# Altium footprint library Connector.PcbLib: 272 footprints (part 15 of 17)
Each footprint in its own frame and in the unit in brackets; x right, y up, seen from the top. Pads: shape width x height; smd on the part's side, far side on the other; paste and mask are expansions set on the pad; w line width, h text height; cw(c..) or ccw(c..) is an arc to the next point about the centre after c.
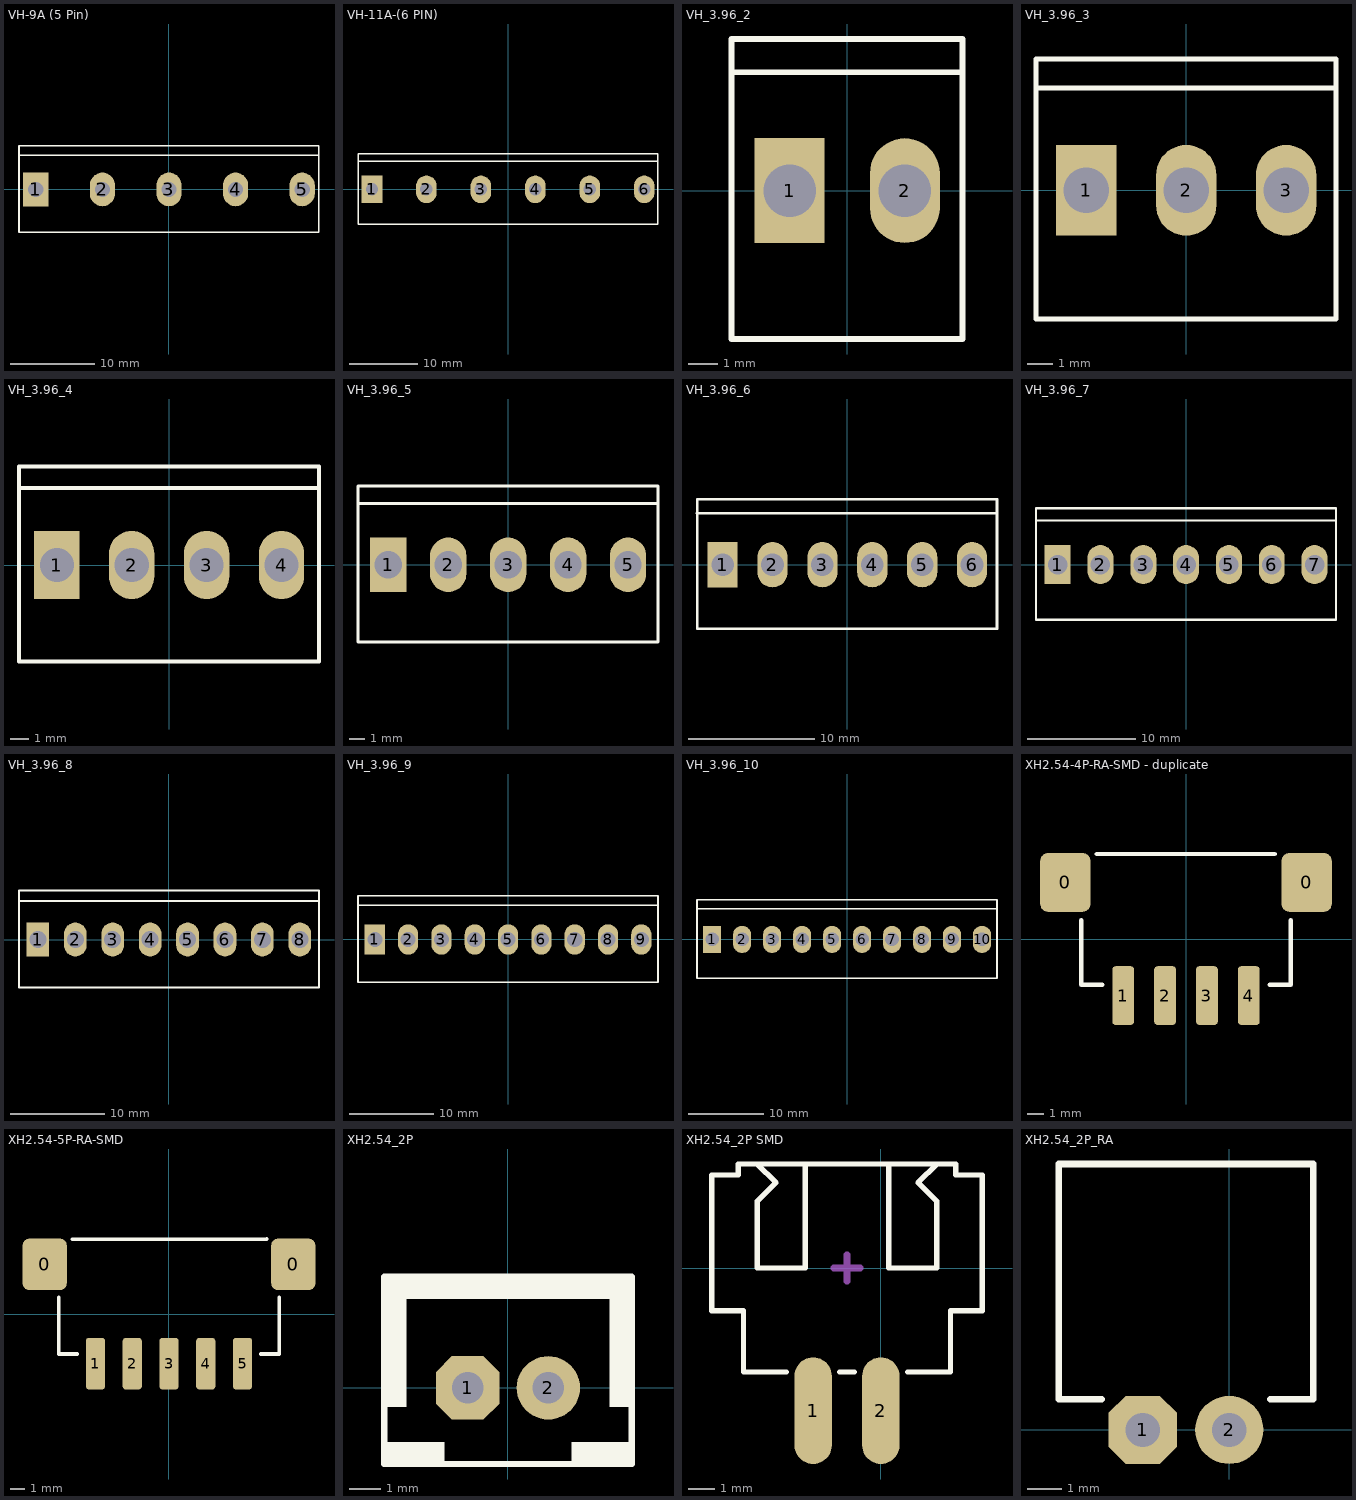
[diagram p14: the footprints below, top view; thin cyan lines are the x and y axes]

## VH-9A (5 Pin) [mm]
height 0.001
pads (5):
  rect 3x4 hole 1.8: 1(-15.84,0)
  oval 3x4 hole 1.8: 2(-7.92,0) 3(0,0) 4(7.92,0) 5(15.84,0)
Top Overlay:
  lines w0.2: -17.84,4.064 17.82,4.064 ; -17.84,-5.1 17.82,-5.1 17.82,5.207 -17.84,5.207 -17.84,-5.1
Top Designator:
  text ".Designator" at -3.71,-0.29 h1.52
3D body "JST - VH - Thru (V) - 9Pin - 3.96mm.stp": height 10.38, standoff -3.95, extent -18.138,-4.648 18.138,4.039

## VH-11A-(6 PIN) [mm]
pads (6):
  rect 3x4 hole 1.8: 1(-19.8,0)
  oval 3x4 hole 1.8: 2(-11.88,0) 3(-3.96,0) 4(3.96,0) 5(11.88,0) 6(19.8,0)
Top Overlay:
  lines w0.2: -21.832,4.064 21.78,4.064 ; -21.8,-5.1 -21.8,5.207 21.78,5.207 21.78,-5.1 -21.8,-5.1
Top Designator:
  text ".Designator" at -3.71,-0.29 h1.52
3D body "JST - VH - Thru (V) - 11Pin - 3.96mm.stp": height 10.38, standoff -3.95, extent -22.098,-4.648 22.098,4.039

## VH_3.96_2 [mm] "Connector; Header; 2 Position"
height 0.001
pads (2):
  rect 2.4x3.6 hole 1.8: 1(-1.98,0)
  oval 2.4x3.6 hole 1.8: 2(1.98,0)
Top Overlay:
  lines w0.2: -3.98,4.064 3.96,4.064 ; -3.98,-5.1 3.96,-5.1 3.96,5.207 -3.98,5.207 -3.98,-5.1
Top Designator:
  text ".Designator" at -3.71,-0.29 h1.52
3D body "JST - VH - Thru (V) - 2Pin - 3.96mm.stp": height 10.38, standoff -3.95, extent -4.278,-4.648 4.278,4.039

## VH_3.96_3 [mm] "Connector; Header; 3 Position"
height 0.001
pads (3):
  rect 2.4x3.6 hole 1.8: 1(-3.96,0)
  oval 2.4x3.6 hole 1.8: 2(0,0) 3(3.96,0)
Top Overlay:
  lines w0.2: -5.96,4.064 5.94,4.064 ; -5.96,-5.1 5.94,-5.1 5.94,5.207 -5.96,5.207 -5.96,-5.1
Top Designator:
  text ".Designator" at -3.71,-0.29 h1.52
3D body "JST - VH - Thru (V) - 3Pin - 3.96mm.stp": height 10.38, standoff -3.95, extent -6.258,-4.648 6.258,4.039

## VH_3.96_4 [mm] "Connector; Header; 4 Position"
height 0.001
pads (4):
  rect 2.4x3.6 hole 1.8: 1(-5.94,0)
  oval 2.4x3.6 hole 1.8: 2(-1.98,0) 3(1.98,0) 4(5.94,0)
Top Overlay:
  lines w0.2: -7.94,4.064 7.92,4.064 ; -7.94,-5.1 7.92,-5.1 7.92,5.207 -7.94,5.207 -7.94,-5.1
Top Designator:
  text ".Designator" at -3.71,-0.29 h1.52
3D body "JST - VH - Thru (V) - 4Pin - 3.96mm.stp": height 10.38, standoff -3.95, extent -8.238,-4.648 8.238,4.039

## VH_3.96_5 [mm] "Connector; Header; 5 Position"
height 0.001
pads (5):
  rect 2.4x3.6 hole 1.8: 1(-7.92,0)
  oval 2.4x3.6 hole 1.8: 2(-3.96,0) 3(0,0) 4(3.96,0) 5(7.92,0)
Top Overlay:
  lines w0.2: -9.92,4.064 9.9,4.064 ; -9.92,-5.1 -9.92,5.207 9.9,5.207 9.9,-5.1 -9.92,-5.1
Top Designator:
  text ".Designator" at -3.71,-0.29 h1.52
3D body "JST - VH - Thru (V) - 5Pin - 3.96mm.stp": height 10.38, standoff -3.95, extent -10.218,-4.648 10.218,4.039

## VH_3.96_6 [mm] "Connector; Header; 6 Position"
height 0.001
pads (6):
  rect 2.4x3.6 hole 1.8: 1(-9.9,0)
  oval 2.4x3.6 hole 1.8: 2(-5.94,0) 3(-1.98,0) 4(1.98,0) 5(5.94,0) 6(9.9,0)
Top Overlay:
  lines w0.2: -11.932,4.064 11.88,4.064 ; -11.9,-5.1 11.88,-5.1 11.88,5.207 -11.9,5.207 -11.9,-5.1
Top Designator:
  text ".Designator" at -3.71,-0.29 h1.52
3D body "JST - VH - Thru (V) - 6Pin - 3.96mm.stp": height 10.38, standoff -3.95, extent -12.198,-4.648 12.198,4.039

## VH_3.96_7 [mm] "Connector; Header; 7 Position"
height 0.001
pads (7):
  rect 2.4x3.6 hole 1.8: 1(-11.88,0)
  oval 2.4x3.6 hole 1.8: 2(-7.92,0) 3(-3.96,0) 4(0,0) 5(3.96,0) 6(7.92,0) 7(11.88,0)
Top Overlay:
  lines w0.2: -13.88,4.064 13.86,4.064 ; -13.88,-5.1 13.86,-5.1 13.86,5.207 -13.88,5.207 -13.88,-5.1
Top Designator:
  text ".Designator" at -3.71,-0.29 h1.52
3D body "JST - VH - Thru (V) - 7Pin - 3.96mm.stp": height 10.38, standoff -3.95, extent -14.178,-4.648 14.178,4.039

## VH_3.96_8 [mm] "Connector; Header; 8 Position"
height 0.001
pads (8):
  rect 2.4x3.6 hole 1.8: 1(-13.86,0)
  oval 2.4x3.6 hole 1.8: 2(-9.9,0) 3(-5.94,0) 4(-1.98,0) 5(1.98,0) 6(5.94,0) 7(9.9,0) 8(13.86,0)
Top Overlay:
  lines w0.2: -15.86,4.064 15.89,4.064 ; -15.86,-5.1 15.89,-5.1 15.89,5.207 -15.86,5.207 -15.86,-5.1
Top Designator:
  text ".Designator" at -3.71,-0.29 h1.52
3D body "JST - VH - Thru (V) - 8Pin - 3.96mm.stp": height 10.38, standoff -3.95, extent -16.158,-4.648 16.158,4.039

## VH_3.96_9 [mm] "Connector; Header; 9 Position"
height 0.001
pads (9):
  rect 2.4x3.6 hole 1.8: 1(-15.84,0)
  oval 2.4x3.6 hole 1.8: 2(-11.88,0) 3(-7.92,0) 4(-3.96,0) 5(0,0) 6(3.96,0) 7(7.92,0) 8(11.88,0) 9(15.84,0)
Top Overlay:
  lines w0.2: -17.84,4.064 17.82,4.064 ; -17.84,-5.1 -17.84,5.207 17.82,5.207 17.82,-5.1 -17.84,-5.1
Top Designator:
  text ".Designator" at -3.71,-0.29 h1.52
3D body "JST - VH - Thru (V) - 9Pin - 3.96mm.stp": height 10.38, standoff -3.95, extent -18.138,-4.648 18.138,4.039

## VH_3.96_10 [mm] "Connector; Header; 10 Position"
height 0.001
pads (10):
  rect 2.4x3.6 hole 1.8: 1(-17.82,0)
  oval 2.4x3.6 hole 1.8: 2(-13.86,0) 3(-9.9,0) 4(-5.94,0) 5(-1.98,0) 6(1.98,0) 7(5.94,0) 8(9.9,0) 9(13.86,0) 10(17.82,0)
Top Overlay:
  lines w0.2: -19.82,4.064 19.8,4.064 ; -19.82,-5.1 -19.82,5.207 19.8,5.207 19.8,-5.1 -19.82,-5.1
Top Designator:
  text ".Designator" at -3.71,-0.29 h1.52
3D body "JST - VH - Thru (V) - 10Pin - 3.96mm.stp": height 10.38, standoff -3.95, extent -20.118,-4.648 20.118,4.039

## XH2.54-4P-RA-SMD - duplicate [mm]
pads (6):
  rrect30% 3x3.5 smd: 0(-7.2,3.375) 0(7.2,3.375)
  rrect30% 1.3x3.5 smd: 1(-3.75,-3.375) 2(-1.25,-3.375) 3(1.25,-3.375) 4(3.75,-3.375)
Top Overlay:
  lines w0.254: -6.25,1.125 -6.25,-2.725 -5,-2.725 ; -5.327,5.075 5.3,5.075 ; 5,-2.725 6.25,-2.725 6.25,1.125
Top Designator:
  text ".Designator" at -3.71,-0.344 h1.52

## XH2.54-5P-RA-SMD [mm]
pads (7):
  rrect30% 3x3.5 smd: 0(-8.45,3.375) 0(8.45,3.375)
  rrect30% 1.3x3.5 smd: 1(-5,-3.375) 2(-2.5,-3.375) 3(0,-3.375) 4(2.5,-3.375) 5(5,-3.375)
Top Overlay:
  lines w0.254: -7.5,1.125 -7.5,-2.725 -6.25,-2.725 ; -6.577,5.075 6.65,5.1 ; 6.25,-2.725 7.5,-2.725 7.5,1.125
Top Designator:
  text ".Designator" at -3.71,-0.344 h1.52

## XH2.54_2P [mm] "PW10-xx-M, JST-BxB-XH-A pitch: 2.5mm"
pads (2):
  oct 2x2 hole 1: 1(-1.27,0)
  round 2 hole 1: 2(1.27,0)
Top Overlay:
  rectangle: -3.9,-2.4 -2,-1.7
  rectangle: -3.9,-0.6 -3.2,3.5
  region: -3.9,3.5 -3.9,2.8 3.9,2.8 3.9,3.5
  region: 3.9,3.5 3.2,3.5 3.2,-0.6 3.9,-0.6
  region: 3.9,-1.7 2,-1.7 2,-2.4 3.9,-2.4
  lines w0.2: -3.9,-2.4 3.9,-2.4 3.9,3.5 -3.9,3.5 -3.9,-2.4
Top Designator:
  text ".Designator" at -3.71,0.206 h1.52
3D body "JST - XH - Thru (V) - 2Pin - 2.54mm.stp": height 7.21, standoff -3, extent -3.607,-2.371 3.607,3.471

## XH2.54_2P SMD [mm] "XH2.54 SMD 2.54 mm"
pads (2):
  oval 1.4x4 smd: 1(-2.54,-5.35) 2(0,-5.35)
Top Overlay:
  lines w0.2: -4.637,3.9 -3.937,3.2 -4.637,2.5 -4.637,0 -2.837,0 -2.837,3.9 ; -3.54,-3.9 -5.15,-3.9 -5.15,-1.6 -6.337,-1.6 -6.337,3.488 -5.352,3.488 -5.352,3.9 2.812,3.9 2.812,3.488 3.797,3.488 3.797,-1.6 2.61,-1.6 2.61,-3.9 1,-3.9 ; -1.54,-3.9 -1,-3.9 ; 0.297,3.9 0.297,0 2.097,0 2.097,2.5 1.397,3.2 2.097,3.9
Top Designator:
  lines w0.254: -1.77,0 -0.77,0 ; -1.27,-0.5 -1.27,0.5
  text ".Designator" at -4.98,1.156 h1.52
3D body "JST - XH - SMD (R) - 2Pin - 2.54mm.stp": height 5.92, standoff 0, extent -6.337,-5.953 3.797,3.953

## XH2.54_2P_RA [mm]
pads (2):
  oct 2x2 hole 1: 1(-2.54,0)
  round 2 hole 1: 2(0,0)
Top Overlay:
  lines w0.2: -3.75,0.9 -5,0.9 -5,7.8 2.46,7.8 2.46,0.9 1.21,0.9
Top Designator:
  text ".Designator" at -4.98,3.055 h1.52
3D body "JST - XH - Thru (R) - 2Pin - 2.54mm.stp": height 5.84, standoff -3.38, extent -4.877,-0.336 2.337,7.7